# Altium schematic symbol library NanoD1.SchLib: 5 symbols
Pins are listed as number, name and electrical type; pins without a type are passive.

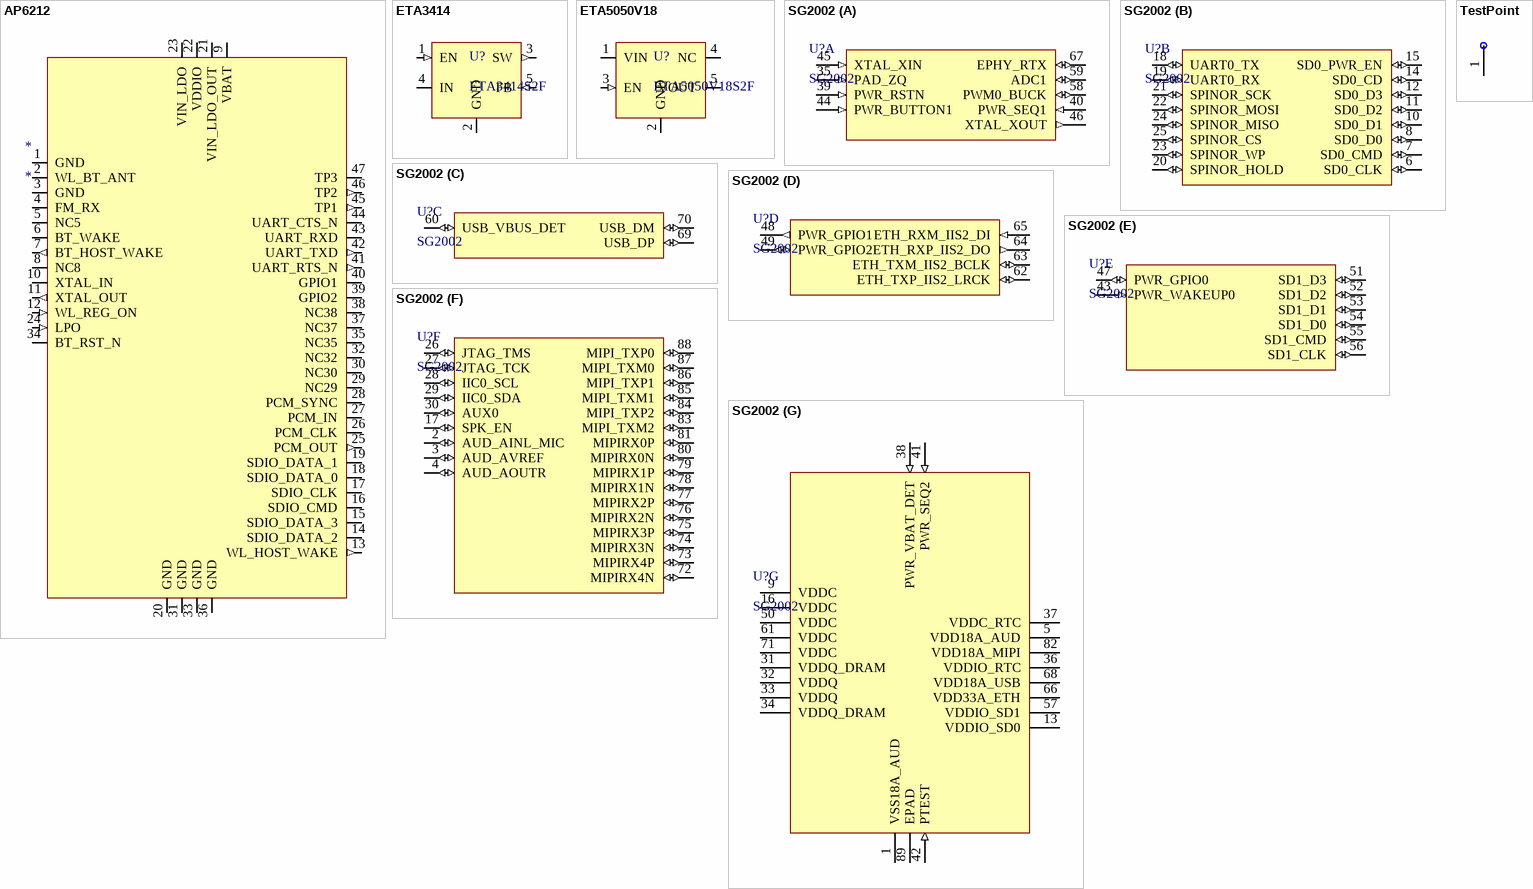
[diagram p0: symbols AP6212 to TestPoint]

## AP6212
designator *
footprint AP6212-12x12
pins: 1 GND (power), 2 WL_BT_ANT, 3 GND (power), 4 FM_RX, 5 NC5, 6 BT_WAKE, 7 BT_HOST_WAKE (out), 8 NC8, 9 VBAT (power), 10 XTAL_IN, 11 XTAL_OUT (out), 12 WL_REG_ON (in), 13 WL_HOST_WAKE (out), 14 SDIO_DATA_2 (io), 15 SDIO_DATA_3 (io), 16 SDIO_CMD (io), 17 SDIO_CLK (io), 18 SDIO_DATA_0 (io), 19 SDIO_DATA_1 (io), 20 GND (power), 21 VIN_LDO_OUT (power), 22 VDDIO (power), 23 VIN_LDO (power), 24 LPO (in), 25 PCM_OUT (out), 26 PCM_CLK (io), 27 PCM_IN, 28 PCM_SYNC (io), 29 NC29, 30 NC30, 31 GND (power), 32 NC32, 33 GND (power), 34 BT_RST_N, 35 NC35, 36 GND (power), 37 NC37, 38 NC38, 39 GPIO2 (io), 40 GPIO1 (io), 41 UART_RTS_N (out), 42 UART_TXD (out), 43 UART_RXD, 44 UART_CTS_N, 45 TP1 (out), 46 TP2 (out), 47 TP3

## ETA3414
designator U?, comment ETA3414S2F
1.5A 3MHz synchronous step-down converter, SOT23-5
footprint SOT23-5 (SOT23, 5-Leads, Body 2.95x2.80mm, Pitch 0.95mm, IPC Medium Density)
pins: 1 EN (in), 2 GND (power), 3 SW (out), 4 IN (power), 5 FB (in)

## ETA5050V18
designator U?, comment ETA5050V18S2F
1.8V fixed LDO, SOT23-5
footprint SOT23-5 (SOT23, 5-Leads, Body 2.95x2.80mm, Pitch 0.95mm, IPC Medium Density)
pins: 1 VIN (power), 2 GND (power), 3 EN (in), 4 NC, 5 VOUT (power)

## SG2002
designator U?
RISC-V C906 / Cortex-A53 SoC, 256MB DDR3 SiP, QFN88 9x9 0.35mm
footprint QFN88-9x9-0.35 (QFN, 88-Leads, Body 9.00x9.00mm, Pitch 0.35mm, Thermal Pad 6.00x6.00mm, IPC Medium Density)
part A pins: 35 PAD_ZQ (in) "ZQ_TP", 39 PWR_RSTN (in) "RESET_N", 40 PWR_SEQ1 (in) "SEQ1_TP", 44 PWR_BUTTON1 (in) "BOOT_BTN", 45 XTAL_XIN (in), 46 XTAL_XOUT (out), 58 PWM0_BUCK (io), 59 ADC1 (io), 67 EPHY_RTX (io) "CPU_SEL"
part B pins: 6 SD0_CLK (io), 7 SD0_CMD (io), 8 SD0_D0 (io), 10 SD0_D1 (io), 11 SD0_D2 (io), 12 SD0_D3 (io), 14 SD0_CD (io), 15 SD0_PWR_EN (io), 18 UART0_TX (io), 19 UART0_RX (io), 20 SPINOR_HOLD (io) "SPI_HOLD", 21 SPINOR_SCK (io) "SPI_CLK", 22 SPINOR_MOSI (io) "SPI_MOSI", 23 SPINOR_WP (io) "SPI_WP", 24 SPINOR_MISO (io) "SPI_MISO", 25 SPINOR_CS (io) "SPI_CS"
part C pins: 60 USB_VBUS_DET (io), 69 USB_DP (io), 70 USB_DM (io)
part D pins: 48 PWR_GPIO1 (out) "AMP_SD_MODE", 49 PWR_GPIO2 (io) "SPARE_1V8", 62 ETH_TXP_IIS2_LRCK (io) "I2S_LRCK", 63 ETH_TXM_IIS2_BCLK (io) "I2S_BCLK", 64 ETH_RXP_IIS2_DO (out) "I2S_DOUT", 65 ETH_RXM_IIS2_DI (in) "I2S_DIN"
part E pins: 43 PWR_WAKEUP0 (in) "WL_HOST_WAKE", 47 PWR_GPIO0 (io) "WL_REG_ON", 51 SD1_D3 (io), 52 SD1_D2 (io), 53 SD1_D1 (io), 54 SD1_D0 (io), 55 SD1_CMD (io), 56 SD1_CLK (io)
part F pins: 2 AUD_AINL_MIC (io) "not connected", 3 AUD_AVREF (io) "not connected", 4 AUD_AOUTR (io) "not connected", 17 SPK_EN (io) "GPIO_A15", 26 JTAG_TMS (io), 27 JTAG_TCK (io), 28 IIC0_SCL (io) "I2C0_SCL", 29 IIC0_SDA (io) "I2C0_SDA", 30 AUX0 (io) "GPIO_AUX0", 72 MIPIRX4N (io) "HDR18_0", 73 MIPIRX4P (io) "HDR18_1", 74 MIPIRX3N (io) "HDR18_2", 75 MIPIRX3P (io) "HDR18_3", 76 MIPIRX2N (io) "HDR18_4", 77 MIPIRX2P (io) "HDR18_5", 78 MIPIRX1N (io) "HDR18_6", 79 MIPIRX1P (io) "HDR18_7", 80 MIPIRX0N (io) "HDR18_8", 81 MIPIRX0P (io) "HDR18_9", 83 MIPI_TXM2 (io) "HDR18_10", 84 MIPI_TXP2 (io) "HDR18_11", 85 MIPI_TXM1 (io) "HDR18_12", 86 MIPI_TXP1 (io) "HDR18_13", 87 MIPI_TXM0 (io) "HDR18_14", 88 MIPI_TXP0 (io) "HDR18_15"
part G pins: 1 VSS18A_AUD (power) "GND", 5 VDD18A_AUD (power) "VDD1V8", 9 VDDC (power), 13 VDDIO_SD0 (power) "VDD3V3", 16 VDDC (power), 31 VDDQ_DRAM (power) "VDD1V35", 32 VDDQ (power) "VDD1V35", 33 VDDQ (power) "VDD1V35", 34 VDDQ_DRAM (power) "VDD1V35", 36 VDDIO_RTC (power) "VDD1V8", 37 VDDC_RTC (power), 38 PWR_VBAT_DET (in) "VBAT_DET", 41 PWR_SEQ2 (in), 42 PTEST (in) "GND", 50 VDDC (power), 57 VDDIO_SD1 (power) "VDD3V3", 61 VDDC (power), 66 VDD33A_ETH (power) "VDD3V3", 68 VDD18A_USB (power), 71 VDDC (power), 82 VDD18A_MIPI (power) "VDD1V8", 89 EPAD (power) "GND"

## TestPoint
designator TP?, comment TP  (value not drawn)
Test point, 1.5 mm exposed pad
footprint TP-1.5mm
pins: 1 TP